# Altium footprint library Amin-Library.PcbLib: 601 footprints (part 15 of 38)
Each footprint in its own frame and in the unit in brackets; x right, y up, seen from the top. Pads: shape width x height; smd on the part's side, far side on the other; paste and mask are expansions set on the pad; w line width, h text height; cw(c..) or ccw(c..) is an arc to the next point about the centre after c.
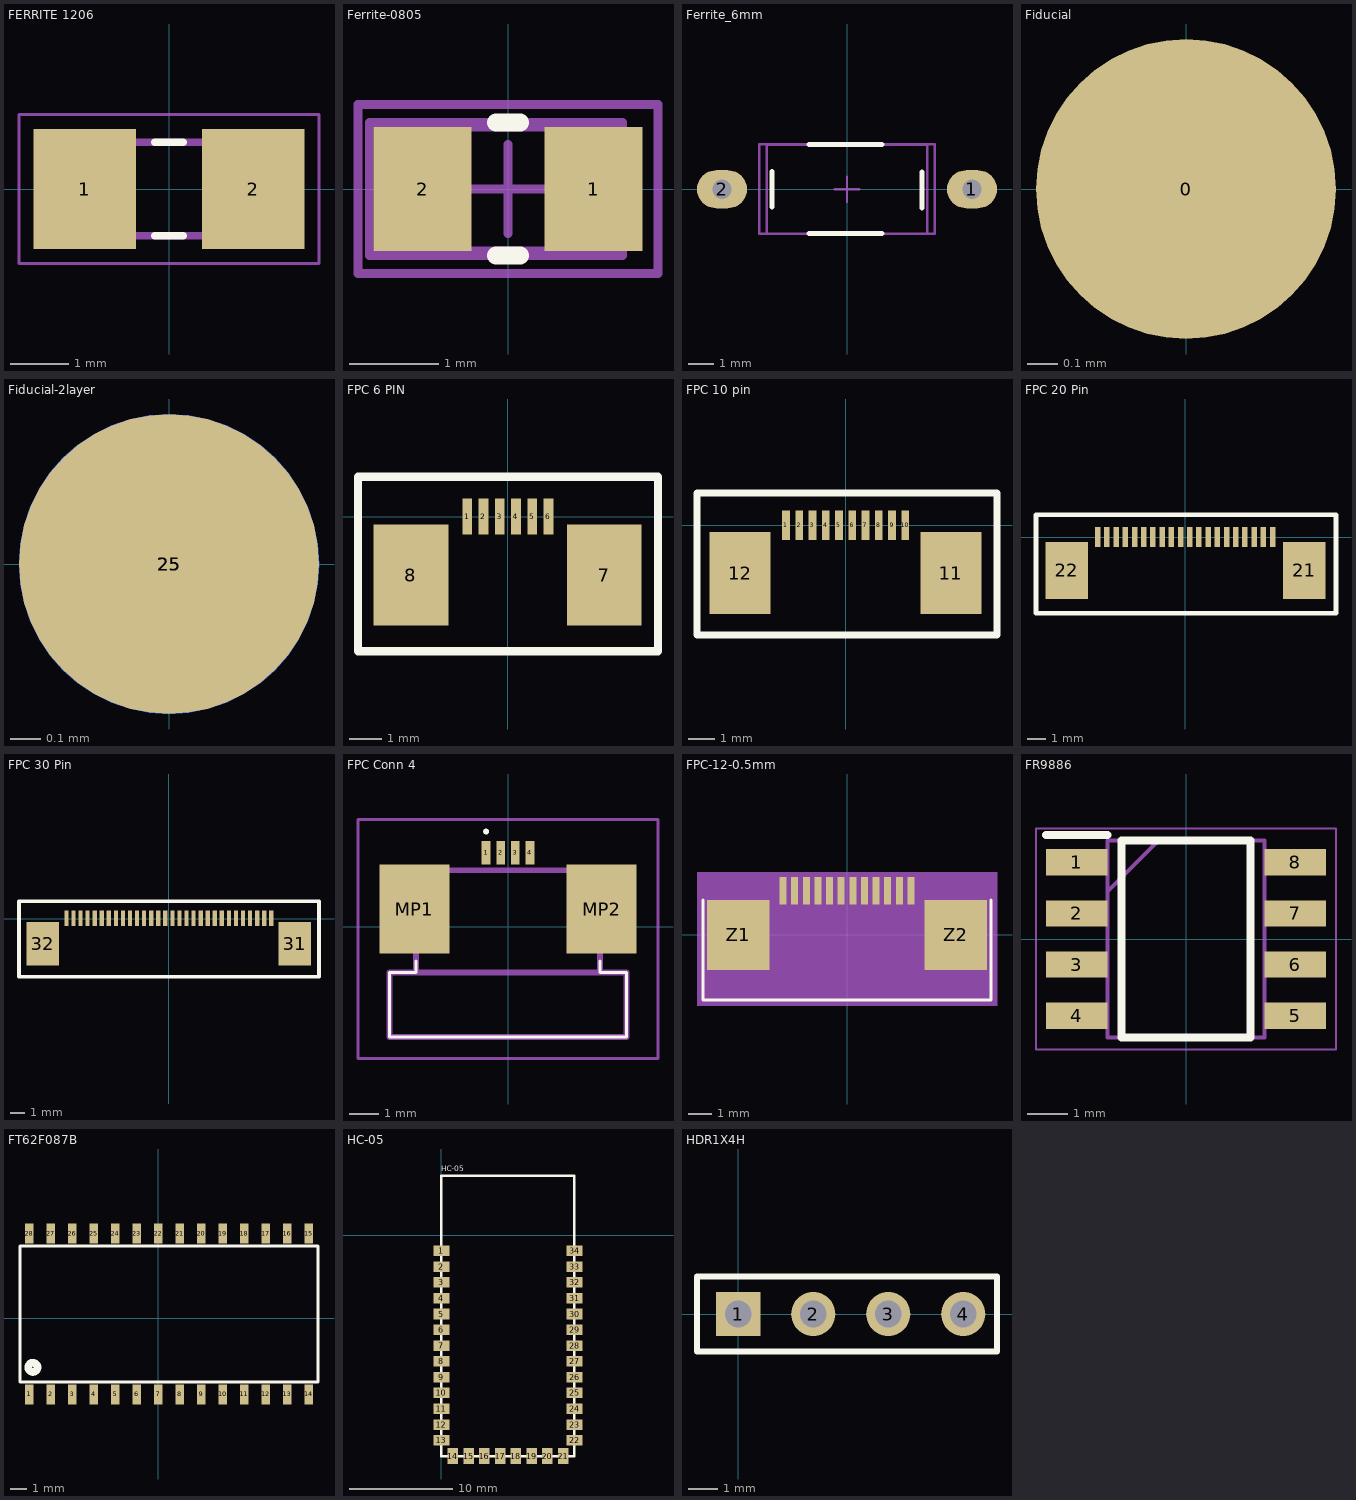
[diagram p14: the footprints below, top view; thin cyan lines are the x and y axes]

## FERRITE 1206 [mm] "1206"
height 0.5
pads (2):
  rect 1.76x2.06 smd: 1(-1.445,0) 2(1.445,0)
Top Overlay:
  lines w0.127: -0.245,-0.8 0.245,-0.8 ; -0.245,0.8 0.245,0.8
Mechanical 13:
  lines w0.127: -1.6,-0.8 1.6,-0.8 1.6,0.8 -1.6,0.8 -1.6,-0.8
Mechanical 15:
  lines w0.05: -2.575,-1.28 2.575,-1.28 2.575,1.28 -2.575,1.28 -2.575,-1.28
3D body "step_temp.STEP": height 1.3, standoff 0, extent -1.5,-0.8 1.5,0.8

## Ferrite-0805 [mm]
height 0.5
pads (2):
  rect 1.1x1.4 smd: 1(0.962,0) 2(-0.962,0)
Top Overlay:
  lines w0.2: -0.137,-0.75 0.138,-0.75 ; -0.137,0.75 0.138,0.75
Mechanical 13:
  lines w0.1: -1.213,-0.7 0.937,-0.7 0.937,0.7 -1.213,0.7 -1.213,-0.7
Mechanical 15:
  lines w0.1: -0.5,0 0.5,0 ; 0,-0.5 0,0.5 ; -1.69,-0.95 -1.69,0.95 1.687,0.95 1.687,-0.95 -1.69,-0.95 ; -1.563,-0.75 1.287,-0.75 1.287,0.75 -1.563,0.75 -1.563,-0.75
3D body "0805.STEP": height 0.6, standoff 0, extent -1.016,-0.635 1.016,0.635

## Ferrite_6mm [mm]
height 0.5
pads (2):
  oval 2x1.524 hole 0.762: 1(5,0) 2(-5,0)
Top Overlay:
  lines w0.2: -3,-0.716 -3,0.716 ; -1.524,-1.778 1.397,-1.778 ; -1.524,1.8 1.397,1.8 ; 3,-0.75 3,0.682
Mechanical 13:
  lines w0.1: -3.2,-1.778 3.2,-1.778 3.2,1.778 -3.2,1.778 -3.2,-1.778
Mechanical 15:
  lines w0.1: -0.5,0 0.5,0 ; 0,-0.5 0,0.5 ; -3.5,-1.778 3.5,-1.778 3.5,1.8 -3.5,1.8 -3.5,-1.778
3D body "User Library-BL01_Series_Pitch_10mm.step": height 3.6, standoff -3.7, extent -5.325,-1.8 5.325,1.8

## Fiducial [mm]
pads (1):
  round 1 smd mask+0.7: 0(0,0)

## Fiducial-2layer [mm]
height 1.91
pads (4):
  round 1 smd paste-1 mask+0.8: 25(0,0) 25(0,0)
  round 1 smd far side paste-1 mask+0.8: 25(0,0) 25(0,0)

## first [mm]

## FPC 6 PIN [mm] "0.5mm Pitch"
pads (8):
  rect 0.3x1.1 smd: 1(-1.246,0) 2(-0.746,0) 3(-0.246,0) 4(0.254,0) 5(0.754,0) 6(1.254,0)
  rect 2.3x3.1 smd: 7(2.972,-1.803) 8(-2.977,-1.803)
Top Overlay:
  lines w0.254: -4.603,-4.14 -4.603,1.219 4.623,1.219 4.623,-4.14 -4.603,-4.14

## FPC 10 pin [mm] "0.5mm Pitch"
pads (12):
  rect 0.3x1.1 smd: 1(-2.246,0) 2(-1.746,0) 3(-1.246,0) 4(-0.746,0) 5(-0.246,0) 6(0.254,0) 7(0.754,0) 8(1.254,0) 9(1.754,0) 10(2.254,0)
  rect 2.3x3.1 smd: 11(3.973,-1.803) 12(-3.977,-1.803)
Top Overlay:
  lines w0.254: -5.603,-4.14 -5.603,1.219 5.715,1.219 5.715,-4.14 -5.603,-4.14

## FPC 20 Pin [mm] "0.5mm Pitch"
pads (22):
  rect 0.3x1.1 smd: 1(-4.746,0) 2(-4.246,0) 3(-3.746,0) 4(-3.246,0) 5(-2.746,0) 6(-2.246,0) 7(-1.746,0) 8(-1.246,0) 9(-0.746,0) 10(-0.246,0) 11(0.254,0) 12(0.754,0) 13(1.254,0) 14(1.754,0) 15(2.254,0) 16(2.754,0) 17(3.254,0) 18(3.754,0) 19(4.254,0) 20(4.754,0)
  rect 2.3x3.1 smd: 21(6.477,-1.803) 22(-6.426,-1.803)
Top Overlay:
  lines w0.254: -8.103,-4.14 8.204,-4.14 8.204,1.219 -8.103,1.219 -8.103,-4.14

## FPC 30 Pin [mm] "0.5mm Pitch"
pads (32):
  rect 0.3x1.1 smd: 1(-7.246,0.025) 2(-6.746,0.025) 3(-6.246,0.025) 4(-5.746,0.025) 5(-5.246,0.025) 6(-4.746,0.025) 7(-4.246,0.025) 8(-3.746,0.025) 9(-3.246,0.025) 10(-2.746,0.025) 11(-2.246,0.025) 12(-1.746,0.025) 13(-1.246,0.025) 14(-0.746,0.025) 15(-0.246,0.025) 16(0.254,0.025) 17(0.754,0.025) 18(1.254,0.025) 19(1.754,0.025) 20(2.254,0.025) 21(2.754,0.025) 22(3.254,0.025) 23(3.754,0.025) 24(4.254,0.025) 25(4.754,0.025) 26(5.254,0.025) 27(5.754,0.025) 28(6.254,0.025) 29(6.754,0.025) 30(7.254,0.025)
  rect 2.3x3.1 smd: 31(8.93,-1.778) 32(-8.926,-1.778)
Top Overlay:
  lines w0.254: -10.603,-4.115 10.632,-4.115 10.632,1.245 -10.603,1.245 -10.603,-4.115

## FPC Conn 4 [mm] "FPC 4way 0.5mm"
pads (6):
  rect 0.3x0.8 smd: 1(-0.75,2.525) 2(-0.25,2.525) 3(0.25,2.525) 4(0.75,2.525)
  rect 2.4x3.05 smd: MP1(-3.2,0.6) MP2(3.2,0.6)
Top Overlay:
  lines w0.1: -3.15,-1.175 -3.15,-1.575 -4.05,-1.575 -4.05,-3.775 4.05,-3.775 4.05,-1.575 3.15,-1.575 3.15,-1.175 ; -0.75,3.2 cw(c-0.75,3.25) -0.75,3.3 cw(c-0.75,3.25) -0.75,3.2
Mechanical 15:
  lines w0.2: -4.05,-3.775 -4.05,-1.575 4.05,-1.575 4.05,-3.775 -4.05,-3.775 ; -3.15,-1.575 -3.15,1.925 3.15,1.925 3.15,-1.575 -3.15,-1.575
Mechanical 20:
  lines w0.1: -5.13,-4.505 -5.13,3.655 5.13,3.655 5.13,-4.505 -5.13,-4.505
3D body "52745-0497.stp": height 2, standoff 0, extent -4.05,-3.795 4.05,2.605

## FPC-12-0.5mm [mm]
pads (14):
  rect 0.3x1.2 smd: 1(-2.75,1.9) 2(-2.25,1.9) 3(-1.75,1.9) 4(-1.25,1.9) 5(-0.75,1.9) 6(-0.25,1.9) 7(0.25,1.9) 8(0.75,1.9) 9(1.25,1.9) 10(1.75,1.9) 11(2.25,1.9) 12(2.75,1.9)
  rect 2.7x3 smd: Z1(-4.68,0) Z2(4.68,0)
Top Overlay:
  lines w0.127: -6.2,1.5 -6.2,-2.8 6.2,-2.8 6.2,1.5
Mechanical 4:
  lines w0.127: -6.2,-2.8 -6.2,1.5 ; -6.2,-2.8 6.2,-2.8 ; -6.2,-2.8 -6.2,1.5 ; -6.2,-2.8 6.2,-2.8 ; -6.2,1.5 6.2,1.5 ; -6.2,1.5 6.2,1.5 ; 6.2,-2.8 6.2,1.5 ; 6.2,-2.8 6.2,1.5
  text "1" at -3.4,-0.37 h1.88
  text "1" at -3.4,-0.37 h1.88
Mechanical 16:
  region: -6.45,2.7 6.45,2.7 6.45,-3.05 -6.45,-3.05

## FR9886 [mm]
pads (8):
  rect 1.525x0.65 smd: 1(-2.712,1.905) 2(-2.712,0.635) 3(-2.712,-0.635) 4(-2.712,-1.905) 5(2.712,-1.905) 6(2.712,-0.635) 7(2.712,0.635) 8(2.712,1.905)
Top Overlay:
  lines w0.2: -3.475,2.58 -1.95,2.58 ; -1.6,-2.45 1.6,-2.45 1.6,2.45 -1.6,2.45 -1.6,-2.45
Mechanical 13:
  lines w0.1: -1.95,1.18 -0.68,2.45 ; -1.95,-2.45 1.95,-2.45 1.95,2.45 -1.95,2.45 -1.95,-2.45
Mechanical 15:
  lines w0.05: -3.725,-2.75 3.725,-2.75 3.725,2.75 -3.725,2.75 -3.725,-2.75
3D body "FR9886SOGTR.stp": height 1.75, standoff 0, extent -3,-2.45 3,2.45

## FT62F087B [mm] "SOP-28"
pads (28):
  rect 0.5x1.2 smd: 1(-7.62,-4.5) 2(-6.35,-4.5) 3(-5.08,-4.5) 4(-3.81,-4.5) 5(-2.54,-4.5) 6(-1.27,-4.5) 7(0,-4.5) 8(1.27,-4.5) 9(2.54,-4.5) 10(3.81,-4.5) 11(5.08,-4.5) 12(6.35,-4.5) 13(7.62,-4.5) 14(8.89,-4.5) 15(8.89,5) 16(7.62,5) 17(6.35,5) 18(5.08,5) 19(3.81,5) 20(2.54,5) 21(1.27,5) 22(0,5) 23(-1.27,5) 24(-2.54,5) 25(-3.81,5) 26(-5.08,5) 27(-6.35,5) 28(-7.62,5)
Top Overlay:
  circle w0.3: c-7.4,-2.9 r0.2
  circle w0.2: c-7.4,-2.9 r0.4
  lines w0.178: -8.16,-3.75 9.43,-3.75 9.43,4.25 -8.16,4.25 -8.16,-3.75

## HC-05 [mil] "Bluetooth module"
pads (34):
  rect 60x40 smd: 1(0,-60) 2(0,-120) 3(0,-180) 4(0,-240) 5(0,-300) 6(0,-360) 7(0,-420) 8(0,-480) 9(0,-540) 10(0,-600) 11(0,-660) 12(0,-720) 13(0,-780) 22(506,-780) 23(506,-720) 24(506,-660) 25(506,-600) 26(506,-540) 27(506,-480) 28(506,-420) 29(506,-360) 30(506,-300) 31(506,-240) 32(506,-180) 33(506,-120) 34(506,-60)
  rect 40x60 smd: 14(43,-840) 15(103,-840) 16(163,-840) 17(223,-840) 18(283,-840) 19(343,-840) 20(403,-840) 21(463,-840)
Top Overlay:
  lines w10: 0,-840 0,225 505,225 505,-840 0,-840
  text "HC-05" at 0,235 h35

## HDR1X4H [mm] "Connector; Header; 4 Position; Right Angle"
pads (4):
  rect 1.5x1.5 hole 0.9: 1(0,0)
  round 1.5 hole 0.9: 2(2.54,0) 3(5.08,0) 4(7.62,0)
Top Overlay:
  lines w0.2: -1.397,-1.27 8.763,-1.27 8.763,1.27 -1.397,1.27 -1.397,-1.27